# Altium footprint library SSA34-E35AT.PcbLib: 1 footprints
Each footprint in its own frame and in the unit in brackets; x right, y up, seen from the top. Pads: shape width x height; smd on the part's side, far side on the other; paste and mask are expansions set on the pad; w line width, h text height; cw(c..) or ccw(c..) is an arc to the next point about the centre after c.
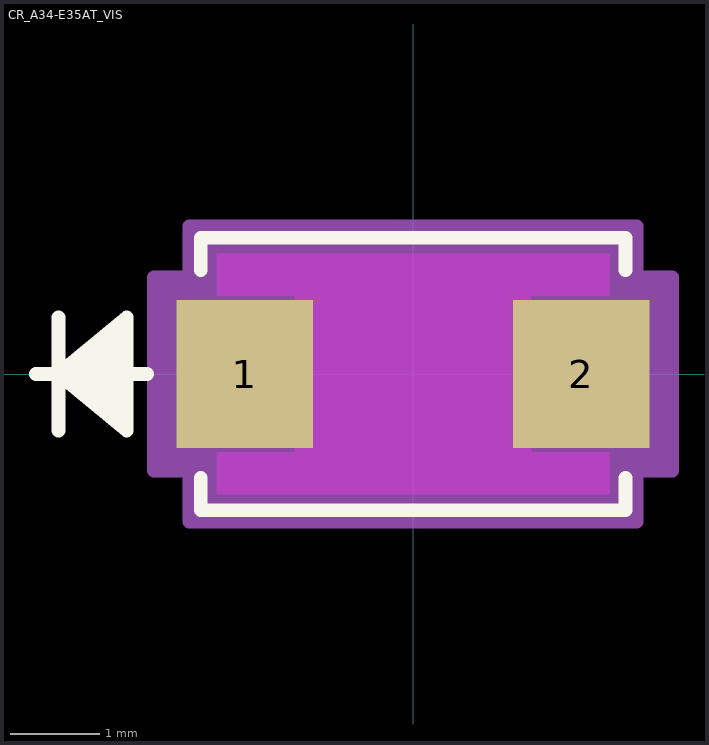
[diagram p0: the footprint, top view; thin cyan lines are the x and y axes]

## CR_A34-E35AT_VIS [mil]
pads (2):
  rect 60x65 smd paste+0 mask+0: 1(-74.02,0) 2(74.02,0)
Top Layer keep-out:
  region: -52.02,-34.5 -52.02,34.5 52.02,34.5 52.02,-34.5
  region: -86.5,34.5 -86.5,53 86.5,53 86.5,34.5
  region: -86.5,-53 -86.5,-34.5 86.5,-34.5 86.5,-53
Top Overlay:
  lines w6: -166.02,0 -117.12,0 ; -156.02,-25 -156.02,25 ; -126.02,-20 -156.02,0 ; -126.02,-15 -156.02,0 ; -126.02,-10 -156.02,0 ; -126.02,-5 -156.02,0 ; -126.02,5 -156.02,0 ; -126.02,10 -156.02,0 ; -126.02,15 -156.02,0 ; -126.02,20 -156.02,0 ; -93.5,-45.6 -93.5,-60 93.5,-60 93.5,-45.6 ; -93.5,45.6 -93.5,60 93.5,60 93.5,45.6 ; -156.02,0 -126.02,25 -126.02,-25 -156.02,0
  text ".Designator" at -137.5,-25 h50
Mechanical 13:
  lines w1: -166.02,0 -116.02,0 ; -156.02,-25 -156.02,25 ; -126.02,-20 -156.02,0 ; -126.02,-15 -156.02,0 ; -126.02,-10 -156.02,0 ; -126.02,-5 -156.02,0 ; -126.02,5 -156.02,0 ; -126.02,10 -156.02,0 ; -126.02,15 -156.02,0 ; -126.02,20 -156.02,0 ; -156.02,0 -126.02,25 -126.02,-25 -156.02,0 ; -88.5,-55 88.5,-55 88.5,55 -88.5,55 -88.5,-55
  text ".Designator" at -137.5,-25 h50
Mechanical 15:
  region: -98.5,-42.5 -114.02,-42.5 -114.02,42.5 -98.5,42.5 -98.5,65 98.5,65 98.5,42.5 114.02,42.5 114.02,-42.5 98.5,-42.5 98.5,-65 -98.5,-65
  lines w6: -114.02,-42.5 -114.02,42.5 -98.5,42.5 -98.5,65 98.5,65 98.5,42.5 114.02,42.5 114.02,-42.5 98.5,-42.5 98.5,-65 -98.5,-65 -98.5,-42.5 -114.02,-42.5
3D body "CR_A34-E35AT_VIS.step": height 92.01, standoff 0, extent -88.5,-55 88.5,55